# Altium schematic symbol library L298N_MOTOR.SchLib: 1 symbol
Pins are listed as number, name and electrical type; pins without a type are passive.

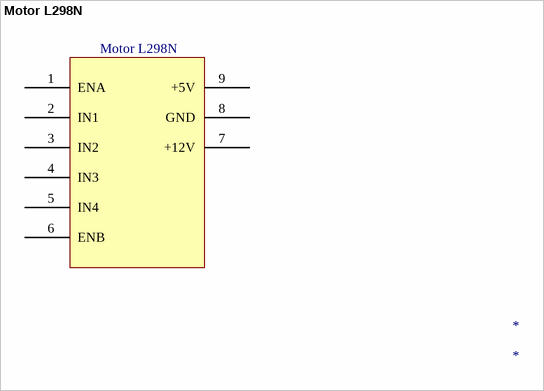
[diagram p0: symbol Motor L298N]

## Motor L298N
designator *
footprint L298N_Module
pins: 1 ENA, 2 IN1, 3 IN2, 4 IN3, 5 IN4, 6 ENB, 7 +12V, 8 GND, 9 +5V